# Altium footprint library 5024940470.PcbLib: 1 footprints
Each footprint in its own frame and in the unit in brackets; x right, y up, seen from the top. Pads: shape width x height; smd on the part's side, far side on the other; paste and mask are expansions set on the pad; w line width, h text height; cw(c..) or ccw(c..) is an arc to the next point about the centre after c.
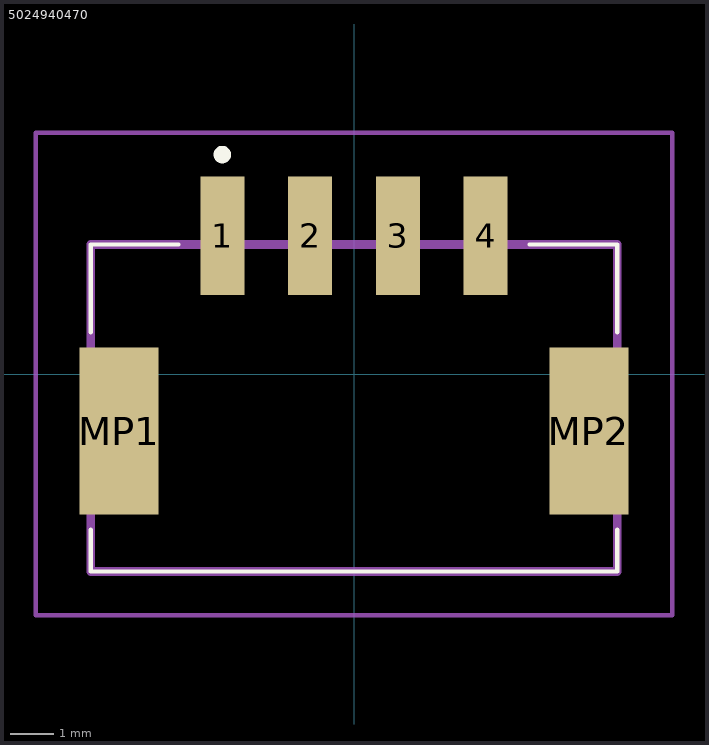
[diagram p0: the footprint, top view; thin cyan lines are the x and y axes]

## 5024940470 [mm]
pads (6):
  rect 1x2.7 smd: 1(-3,3.15) 2(-1,3.15) 3(1,3.15) 4(3,3.15)
  rect 1.8x3.8 smd: MP1(-5.35,-1.3) MP2(5.35,-1.3)
Top Overlay:
  lines w0.1: -6,-3.55 -6,-4.5 6,-4.5 6,-3.55 ; -6,0.95 -6,2.95 -4,2.95 ; 4,2.95 6,2.95 6,0.95
  lines w0.2: -3.1,5 -3.1,5 ; -3.1,5 ccw(c-3,5) -2.9,5 ; -3.1,5 cw(c-3,5) -2.9,5 ; -2.9,5 -2.9,5
Mechanical 15:
  lines w0.2: -6,-4.5 6,-4.5 6,2.95 -6,2.95 -6,-4.5
Mechanical 20:
  lines w0.1: -7.25,-5.5 7.25,-5.5 7.25,5.5 -7.25,5.5 -7.25,-5.5